# Altium schematic symbol library Orion-Bridge.SchLib: 24 symbols
Pins are listed as number, name and electrical type; pins without a type are passive.

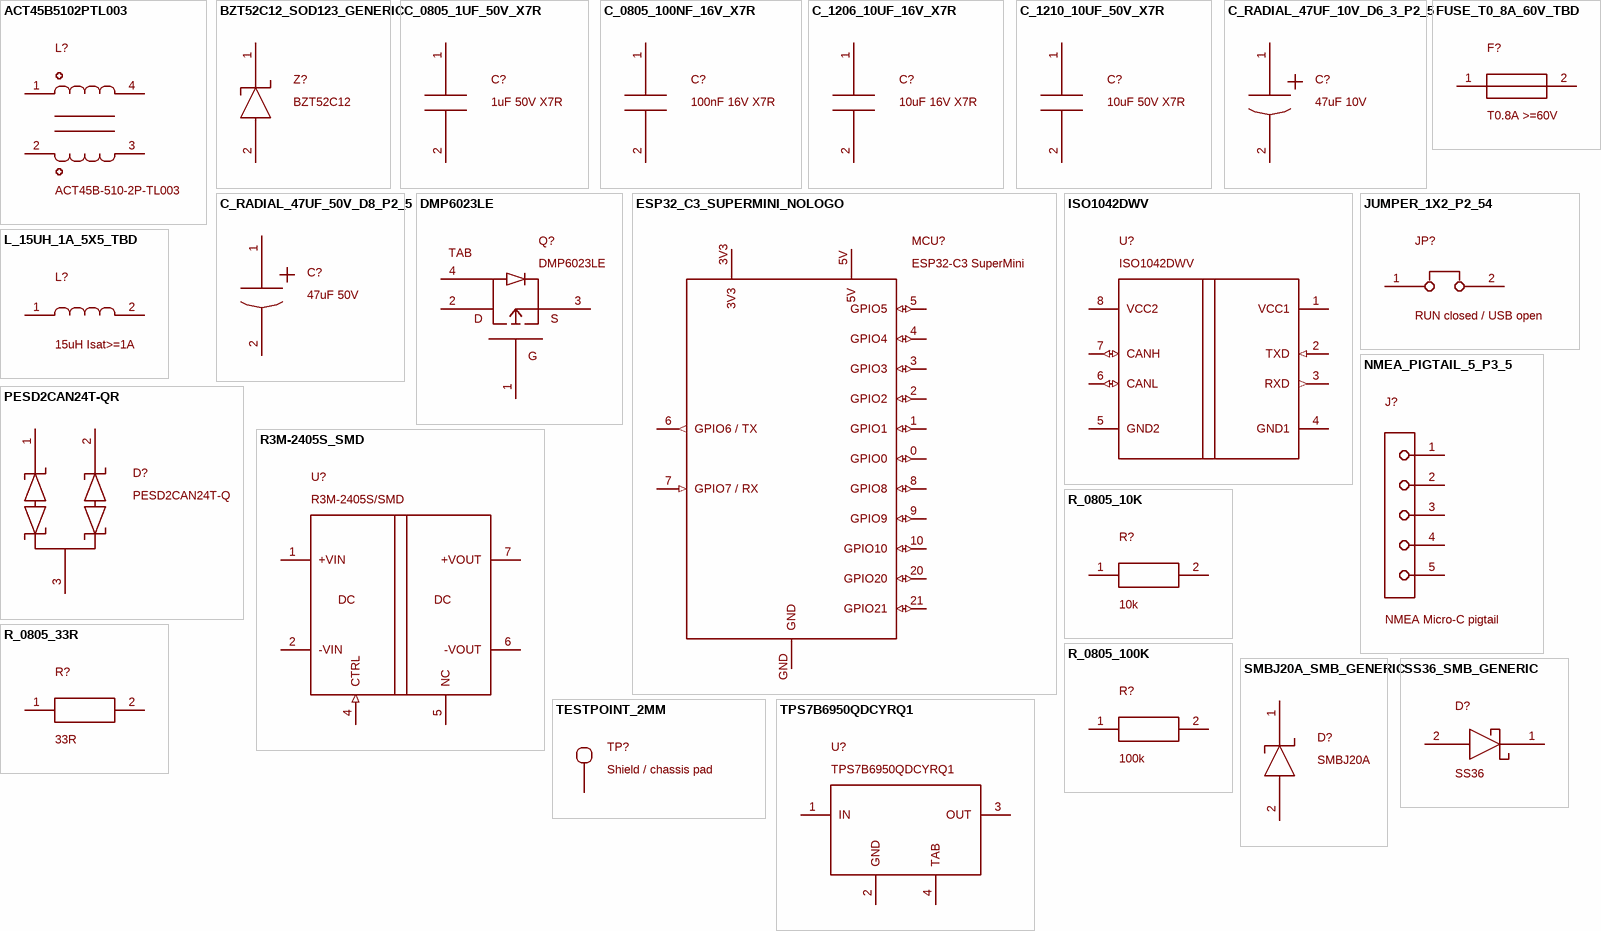
[diagram p0: symbols ACT45B5102PTL003 to TPS7B6950QDCYRQ1]

## ACT45B5102PTL003
designator L?, comment ACT45B-510-2P-TL003
Manufacturer: TDK; MPN: ACT45B5102PTL003; Manufacturer Part Number: ACT45B5102PTL003; Description: ACT45B-510-2P-TL003; Datasheet: https://www.tdk-electronics.tdk.com/inf/30/ds/act45b.pdf; Footprint Status: PROVISIONAL - verify landpattern before fabrication
footprint ACT45B
pins: 1 H_EXT, 2 L_EXT, 3 L_IC, 4 H_IC

## BZT52C12_SOD123_GENERIC
designator Z?, comment BZT52C12
BZT52C12 - generic specification; manufacturer/MPN not selected; Footprint Status: PROVISIONAL - verify landpattern before fabrication
footprint SOD123
pins: 1 K, 2 A

## C_0805_1UF_50V_X7R
designator C?, comment 1uF 50V X7R
1uF 50V X7R - generic specification; manufacturer/MPN not selected; Footprint Status: PROVISIONAL - verify landpattern before fabrication
footprint C0805
pins: 1, 2

## C_0805_100NF_16V_X7R
designator C?, comment 100nF 16V X7R
100nF 16V X7R - generic specification; manufacturer/MPN not selected; Footprint Status: PROVISIONAL - verify landpattern before fabrication
footprint C0805
pins: 1, 2

## C_1206_10UF_16V_X7R
designator C?, comment 10uF 16V X7R
10uF 16V X7R - generic specification; manufacturer/MPN not selected; Footprint Status: PROVISIONAL - verify landpattern before fabrication
footprint C1206
pins: 1, 2

## C_1210_10UF_50V_X7R
designator C?, comment 10uF 50V X7R
10uF 50V X7R - generic specification; manufacturer/MPN not selected; Footprint Status: PROVISIONAL - verify landpattern before fabrication
footprint C1210
pins: 1, 2

## C_RADIAL_47UF_10V_D6_3_P2_5
designator C?, comment 47uF 10V
47uF 10V - generic specification; manufacturer/MPN not selected; Footprint Status: PROVISIONAL - verify landpattern before fabrication
footprint TBD_CAP_RADIAL_P2.5_D6.3
pins: 1 +, 2 -

## C_RADIAL_47UF_50V_D8_P2_5
designator C?, comment 47uF 50V
47uF 50V - generic specification; manufacturer/MPN not selected; Footprint Status: PROVISIONAL - verify landpattern before fabrication
footprint TBD_CAP_RADIAL_P2.5_D8
pins: 1 +, 2 -

## DMP6023LE
designator Q?
Manufacturer: Diodes Incorporated; MPN: DMP6023LE; Manufacturer Part Number: DMP6023LE; Description: DMP6023LE; Datasheet: https://www.diodes.com/datasheet/download/DMP6023LE.pdf; Footprint Status: PROVISIONAL - verify landpattern before fabrication
footprint SOT223_PMOS
pins: 1 G, 2 D, 3 S, 4 TAB=D
text: TAB

## ESP32_C3_SUPERMINI_NOLOGO
designator MCU?, comment ESP32-C3 SuperMini
Nologo ESP32-C3 SuperMini module, two 1x8 carrier headers, GPIO6 TX / GPIO7 RX; Manufacturer: Nologo Tech; MPN: ESP32-C3 SuperMini; Manufacturer Part Number: ESP32-C3 SuperMini; Datasheet: https://github.com/NologoTech/ESP32C3-Supermini/tree/main/Hardware; Footprint Status: Nologo source-based header geometry; selected clone, sockets and USB clearance require mechanical review
footprint NOLOGO_C3_SUPERMINI_THT_2X8
pins: 0 GPIO0 (io), 1 GPIO1 (io), 2 GPIO2 (io), 3 GPIO3 (io), 3V3 (power), 4 GPIO4 (io), 5 GPIO5 (io), 5V (power), 6 GPIO6 / TX (out), 7 GPIO7 / RX (in), 8 GPIO8 (io), 9 GPIO9 (io), 10 GPIO10 (io), 20 GPIO20 (io), 21 GPIO21 (io), GND (power)

## FUSE_T0_8A_60V_TBD
designator F?, comment T0.8A >=60V
T0.8A >=60V - generic specification; manufacturer/MPN not selected; Footprint Status: PROVISIONAL - verify landpattern before fabrication
footprint TBD_FUSE_9X6
pins: 1, 2

## ISO1042DWV
designator U?
Manufacturer: Texas Instruments; MPN: ISO1042DWV; Manufacturer Part Number: ISO1042DWV; Description: ISO1042DWV; Datasheet: https://www.ti.com/lit/ds/symlink/iso1042.pdf; Footprint Status: PROVISIONAL - verify landpattern before fabrication
footprint SOIC8_DWV
pins: 1 VCC1 (power), 2 TXD (in), 3 RXD (out), 4 GND1 (power), 5 GND2 (power), 6 CANL (io), 7 CANH (io), 8 VCC2 (power)

## JUMPER_1X2_P2_54
designator JP?, comment RUN closed / USB open
RUN closed / USB open - generic specification; manufacturer/MPN not selected; Footprint Status: PROVISIONAL - verify landpattern before fabrication
footprint HDR1X2_2.54
pins: 1, 2

## L_15UH_1A_5X5_TBD
designator L?, comment 15uH Isat>=1A
15uH Isat>=1A - generic specification; manufacturer/MPN not selected; Footprint Status: PROVISIONAL - verify landpattern before fabrication
footprint TBD_INDUCTOR_5X5
pins: 1, 2

## NMEA_PIGTAIL_5_P3_5
designator J?, comment NMEA Micro-C pigtail
NMEA Micro-C pigtail - generic specification; manufacturer/MPN not selected; Footprint Status: TBD terminal MPN, pitch and pin order; logical Micro-C numbering, not a connector face view
footprint TBD_TERMINAL_5_3.5
pins: 1 SHIELD, 2 NET-S, 3 NET-C, 4 CAN-H, 5 CAN-L

## PESD2CAN24T-QR
designator D?, comment PESD2CAN24T-Q
Manufacturer: Nexperia; MPN: PESD2CAN24T-QR; Manufacturer Part Number: PESD2CAN24T-QR; Description: PESD2CAN24T-Q; Datasheet: https://assets.nexperia.com/documents/data-sheet/PESD2CAN24T-Q.pdf; Footprint Status: PROVISIONAL - verify landpattern before fabrication
footprint SOT23
pins: 1 K1, 2 K2, 3 CC

## R3M-2405S_SMD
designator U?, comment R3M-2405S/SMD
Manufacturer: RECOM; MPN: R3M-2405S/SMD; Manufacturer Part Number: R3M-2405S/SMD; Description: R3M-2405S/SMD; Datasheet: https://recom-power.com/pdf/Econoline/R3M.pdf; Footprint Status: PROVISIONAL - verify landpattern before fabrication
footprint R3M_SMD
pins: 1 +VIN (power), 2 -VIN (power), 4 CTRL (in), 5 NC, 6 -VOUT (power), 7 +VOUT (power)
text: DC

## R_0805_10K
designator R?, comment 10k
10k - generic specification; manufacturer/MPN not selected; Footprint Status: PROVISIONAL - verify landpattern before fabrication
footprint R0805
pins: 1, 2

## R_0805_33R
designator R?, comment 33R
33R - generic specification; manufacturer/MPN not selected; Footprint Status: PROVISIONAL - verify landpattern before fabrication
footprint R0805
pins: 1, 2

## R_0805_100K
designator R?, comment 100k
100k - generic specification; manufacturer/MPN not selected; Footprint Status: PROVISIONAL - verify landpattern before fabrication
footprint R0805
pins: 1, 2

## SMBJ20A_SMB_GENERIC
designator D?, comment SMBJ20A
SMBJ20A - generic specification; manufacturer/MPN not selected; Footprint Status: PROVISIONAL - verify landpattern before fabrication
footprint SMB
pins: 1 K, 2 A

## SS36_SMB_GENERIC
designator D?, comment SS36
SS36 - generic specification; manufacturer/MPN not selected; Footprint Status: PROVISIONAL - verify landpattern before fabrication
footprint SMB
pins: 1 K, 2 A

## TESTPOINT_2MM
designator TP?, comment Shield / chassis pad
Shield / chassis pad - generic specification; manufacturer/MPN not selected; Footprint Status: PROVISIONAL - verify landpattern before fabrication
footprint TESTPOINT_2MM
pins: 1 SHIELD

## TPS7B6950QDCYRQ1
designator U?
Manufacturer: Texas Instruments; MPN: TPS7B6950QDCYRQ1; Manufacturer Part Number: TPS7B6950QDCYRQ1; Description: TPS7B6950QDCYRQ1; Datasheet: https://www.ti.com/lit/ds/symlink/tps7b69-q1.pdf; Footprint Status: PROVISIONAL - verify landpattern before fabrication
footprint SOT223_LDO
pins: 1 IN (power), 2 GND (power), 3 OUT (power), 4 TAB (power)